# Altium schematic symbol library Gateway_Closure.SchLib: 13 symbols
Pins are listed as number, name and electrical type; pins without a type are passive.

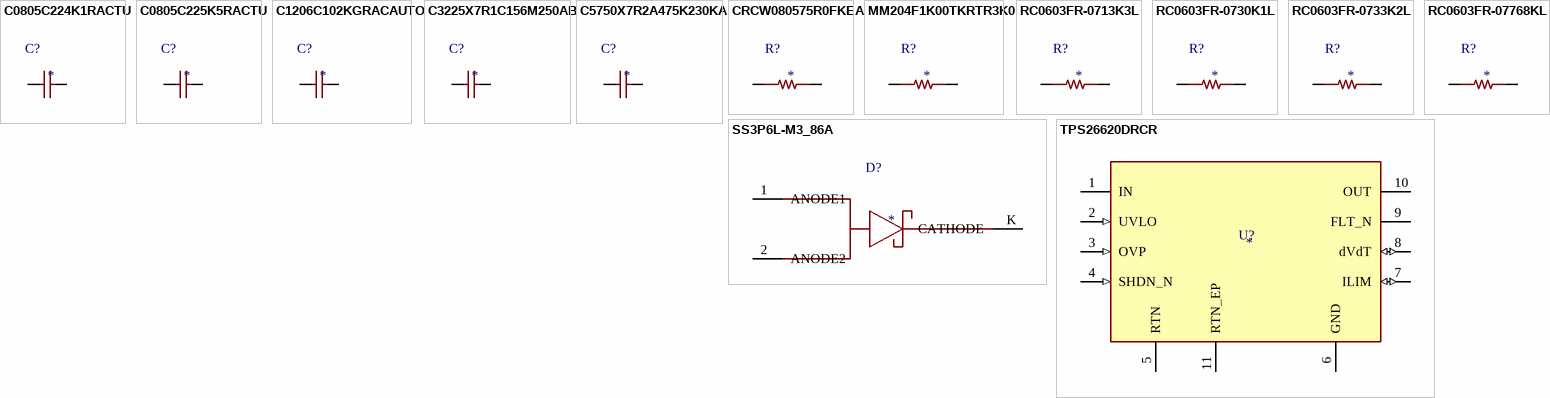
[diagram p0: symbols C0805C224K1RACTU to TPS26620DRCR]

## C0805C224K1RACTU
designator C?
KEMET exact0805 spec body/termination dimensions; KEMET C1027 p12 Table3 nominal2012 reflow lands transferred to mechanically matching commercial0805; 220nF10%100VX7R;; Manufacturer Part Number: C0805C224K1RACTU; Design Approval: PROTOTYPE_APPROVED; Electrical Test: NOT_TESTED; CAD Status: CAD_VERIFIED; Limitations: None; Manufacturer: KEMET; Value: 220nF10%100VX7R; Source: KEMET exact0805 spec body/termination dimensions; KEMET C1027 p12 Table3 nominal2012 reflow lands transferred to mechanically matching commercial0805
footprint GW_0805_KEMET_NOMINAL
pins: 1, 2

## C0805C225K5RACTU
designator C?
KEMET exact0805 spec body/termination dimensions; KEMET C1027 p12 Table3 nominal2012 reflow lands transferred to mechanically matching commercial0805; 2.2uF10%50VX7R; VCC5V local bypass;2.2uF prototype selection replaces known insufficient1uF part. Assumed>=60% bias retention; verify stableVCC at bring-up.; Manufacturer Part Number: C0805C225K5RACTU; Design Approval: PROTOTYPE_APPROVED; Electrical Test: NOT_TESTED; CAD Status: CAD_VERIFIED; Manufacturer: KEMET; Value: 2.2uF10%50VX7R; Source: KEMET exact0805 spec body/termination dimensions; KEMET C1027 p12 Table3 nominal2012 reflow lands transferred to mechanically matching commercial0805; Limitations: VCC5V local bypass;2.2uF prototype selection replaces known insufficient1uF part. Assumed>=60% bias retention; verify stableVCC at bring-up.
footprint GW_0805_KEMET_NOMINAL
pins: 1, 2

## C1206C102KGRACAUTO
designator C?
KEMET1nF10%2kVDCX7R1206; Ethernet chassis AC return; no safety-Y or surge claim; Manufacturer: KEMET; Manufacturer Part Number: C1206C102KGRACAUTO; Value: 1 nF; Tolerance: 10%; Voltage Rating: 2000 VDC; Dielectric: X7R; CAD Status: CAD_VERIFIED; Electrical Approval: PROVISIONAL_APPLICATION; not safety-Y certified; Electrical Test: NOT_TESTED; Assembly: JLC Extended observed2026-11-07; quantity unknown; no stock reservation; Package: 1206 /3216; Datasheet: sources/ethernet_1nf/C600002.pdf; Source: KEMET C1076_X7R_HV_AUTO_SMD9/10/2019 pp1-2 ordering/rating,p4 body,p10 Table3 densityB1206; C600002 exact catalog identity; LCSC Part Number: C600002; Terminal Mapping: Nonpolar, project1-left/2-right; symbol1->pad1,2->pad2
footprint GW_C1206_KEMET_C1076_DENSITY_B
pins: 1, 2

## C3225X7R1C156M250AB
designator C?
TDK official C3225X7R1C156M250AB product page lands PA2.0-2.4 PB1.0-1.2 PC1.9-2.5; TI table10-1 rated45uF example; 15uF20%16VX7R; 3 per buck:45uF rated per TI1MHz example. Prototype load-step/ripple confirmation pending; do not connect to24V input.; Design Approval: PROTOTYPE_APPROVED; Electrical Test: NOT_TESTED; CAD Status: CAD_VERIFIED; Manufacturer: TDK; Manufacturer Part Number: C3225X7R1C156M250AB; Value: 15uF20%16VX7R; Source: TDK official C3225X7R1C156M250AB product page lands PA2.0-2.4 PB1.0-1.2 PC1.9-2.5; TI table10-1 rated45uF example; Limitations: 3 per buck:45uF rated per TI1MHz example. Prototype load-step/ripple confirmation pending; do not connect to24V input.
footprint GW_C3225_TDK_REFLOW
pins: 1, 2

## C5750X7R2A475K230KA
designator C?
TDK C5750X7R2A475K230KA exact2014web-derived PDF p1 lands,p2 DCbias; current official product page same PA/PB/PC; 4.7uF10%100VX7R;; Design Approval: PROTOTYPE_APPROVED; Electrical Test: NOT_TESTED; CAD Status: CAD_VERIFIED; Limitations: None; Manufacturer: TDK; Manufacturer Part Number: C5750X7R2A475K230KA; Value: 4.7uF10%100VX7R; Source: TDK C5750X7R2A475K230KA exact2014web-derived PDF p1 lands,p2 DCbias; current official product page same PA/PB/PC
footprint GW_C5750_TDK_REFLOW
pins: 1, 2

## CRCW080575R0FKEA
designator R?
75Ohm1%0.125W0805 Vishay D/CRCW e3; Ethernet cable termination; not C-suffix commodity variant; Manufacturer Part Number: CRCW080575R0FKEA; Value: 75 Ohm; Tolerance: 1%; Power Rating: 0.125 W at70C; derating applies; TCR: 100 ppm/K; Local Datasheet: sources/ethernet_75ohm/C844859.pdf; CAD Status: CAD_VERIFIED; Design Approval: RETAINED_ORIGINAL_SELECTION; Electrical Test: NOT_TESTED; Assembly: JLC Extended observed; quantity unknown; verify before ordering; Manufacturer: Vishay; Package: 0805 /2012; Datasheet: https://www.vishay.com/docs/20035/dcrcwe3.pdf; Source: Vishay20035 Rev18-Jun-2018 p3 ordering, p9 body/reflow lands; JLC C844859 exact identity observed2026-11-07; LCSC Part Number: C844859; Terminal Mapping: Nonpolar resistor: project pin1=left pad1,pin2=right pad2
footprint GW_CRCW0805_VISHAY_20035_REFLOW
pins: 1, 2

## MM204F1K00TKRTR3K0
designator R?
MM204F1K00TKRTR3K0; CAD_VERIFIED_GEOMETRY; Saved1.3x1.6landsatx+/-1.45mmmatchmanufacturerreflowtable. Nonpolar1/2projectmappingverified. NormalDIType3applicationonly;no500V/1kVsurgequalificationinferredfromMELFor0.25W. NativeDIresistornetsmustbecorrected.; Manufacturer: Firstohm; CAD Status: CAD_VERIFIED_GEOMETRY;NATIVE_ECO_PENDING; Manufacturer Part Number: MM204F1K00TKRTR3K0; Source: FirstohmMMRev08March2023printedp78/PDF4MM16/MM204REFLOW:L1.3min,W1.6min,innerP1.6+/-.1mm; Limitations: Saved1.3x1.6landsatx+/-1.45mmmatchmanufacturerreflowtable. Nonpolar1/2projectmappingverified. NormalDIType3applicationonly;no500V/1kVsurgequalificationinferredfromMELFor0.25W. NativeDIresistornetsmustbecorrected.
footprint GW_MM204_FIRSTOHM
pins: 1, 2

## RC0603FR-0713K3L
designator R?
13.3kOhm1%0.1W75V; Exact Yageo spec; manufacturer Mounting2018p4Fig4/Table1; Manufacturer Part Number: RC0603FR-0713K3L; Design Approval: PROPOSED_APPLICATION_VALUE; CAD Status: CAD_VERIFIED; Electrical Test: NOT_TESTED; Manufacturer: Yageo; Value: 13.3kOhm1%0.1W75V; Source: Exact Yageo spec; manufacturer Mounting2018p4Fig4/Table1; Datasheet: https://yageogroup.com/download/specsheet/RC0603FR-0713K3L
footprint GW_RC0603_YAGEO_REFLOW
pins: 1, 2

## RC0603FR-0730K1L
designator R?
30.1kOhm1%0.1W75V; Exact Yageo spec; manufacturer Mounting2018p4Fig4/Table1; Manufacturer Part Number: RC0603FR-0730K1L; Design Approval: PROPOSED_APPLICATION_VALUE; CAD Status: CAD_VERIFIED; Electrical Test: NOT_TESTED; Manufacturer: Yageo; Value: 30.1kOhm1%0.1W75V; Source: Exact Yageo spec; manufacturer Mounting2018p4Fig4/Table1; Datasheet: https://yageogroup.com/download/specsheet/RC0603FR-0730K1L
footprint GW_RC0603_YAGEO_REFLOW
pins: 1, 2

## RC0603FR-0733K2L
designator R?
33.2kOhm1%0.1W75V; Exact Yageo spec; manufacturer Mounting2018p4Fig4/Table1; Manufacturer Part Number: RC0603FR-0733K2L; Design Approval: PROPOSED_APPLICATION_VALUE; CAD Status: CAD_VERIFIED; Electrical Test: NOT_TESTED; Manufacturer: Yageo; Value: 33.2kOhm1%0.1W75V; Source: Exact Yageo spec; manufacturer Mounting2018p4Fig4/Table1; Datasheet: https://yageogroup.com/download/specsheet/RC0603FR-0733K2L
footprint GW_RC0603_YAGEO_REFLOW
pins: 1, 2

## RC0603FR-07768KL
designator R?
768kOhm1%0.1W75V; Exact Yageo spec; manufacturer Mounting2018p4Fig4/Table1; Manufacturer Part Number: RC0603FR-07768KL; Design Approval: PROPOSED_APPLICATION_VALUE; CAD Status: CAD_VERIFIED; Electrical Test: NOT_TESTED; Manufacturer: Yageo; Value: 768kOhm1%0.1W75V; Source: Exact Yageo spec; manufacturer Mounting2018p4Fig4/Table1; Datasheet: https://yageogroup.com/download/specsheet/RC0603FR-07768KL
footprint GW_RC0603_YAGEO_REFLOW
pins: 1, 2

## SS3P6L-M3_86A
designator D?
User-approved series reverse diode:manufacturer1/2 anodes,K large cathode. Same model also reserved DNP output clamp; do not populateSOUT withoutVF review. No hot reverse while charged.; Manufacturer: Vishay; Manufacturer Part Number: SS3P6L-M3/86A; CAD Status: CAD_VERIFIED; Electrical Approval: PROTOTYPE_APPROVED; Electrical Test: NOT_TESTED; Source: Vishay88987 Rev24-Apr-2020 pp1,4; numbered anodes1/2, cathodeK; minimum mounting lands; Datasheet: sources/SS3P6L_88987.pdf; Limitations: User-approved series reverse diode:manufacturer1/2 anodes,K large cathode. Same model also reserved DNP output clamp; do not populateSOUT withoutVF review. No hot reverse while charged.; Design Approval: PROTOTYPE_APPROVED
footprint GW_SS3P6L_VISHAY_88987
pins: 1 ANODE1, 2 ANODE2, K CATHODE

## TPS26620DRCR
designator U?
Single-channel60V eFuse; TPS26620 latch-off; RTN != system GND; DRC10+EP11; Manufacturer: Texas Instruments; Manufacturer Part Number: TPS26620DRCR; Local Datasheet: sources/tps26620/tps2662.pdf; CAD Status: CAD_CANDIDATE; Design Approval: APPROVED_COMPONENT_SELECTION; Electrical Test: NOT_TESTED; Critical Connection: Pin5 and EP11 to EF_RTN, NEVER directly to system GND pin6; Fault Response: TPS26620 latch-off, adjustable overvoltage cutoff; not TPS26621 auto-retry; Datasheet: https://www.ti.com/lit/ds/symlink/tps2662.pdf; Source: TI TPS2662 SLVSDT4F Dec2021 Table6-1 p4; DRC0010J4218878/B board p44/stencil p45; Footprint Limitation: Native custom-pad11 extension conversion/net inheritance pending; not PCB-release ready
footprint GW_DRC0010J_TI_TPS2662_EPU
pins: 1 IN (power), 2 UVLO (in), 3 OVP (in), 4 SHDN_N (in), 5 RTN (power), 6 GND (power), 7 ILIM (io), 8 dVdT (io), 9 FLT_N (oc), 10 OUT (power), 11 RTN_EP (power)